# Altium footprint library FootPrintLib_8.PcbLib: 590 footprints (part 26 of 37)
Each footprint in its own frame and in the unit in brackets; x right, y up, seen from the top. Pads: shape width x height; smd on the part's side, far side on the other; paste and mask are expansions set on the pad; w line width, h text height; cw(c..) or ccw(c..) is an arc to the next point about the centre after c.
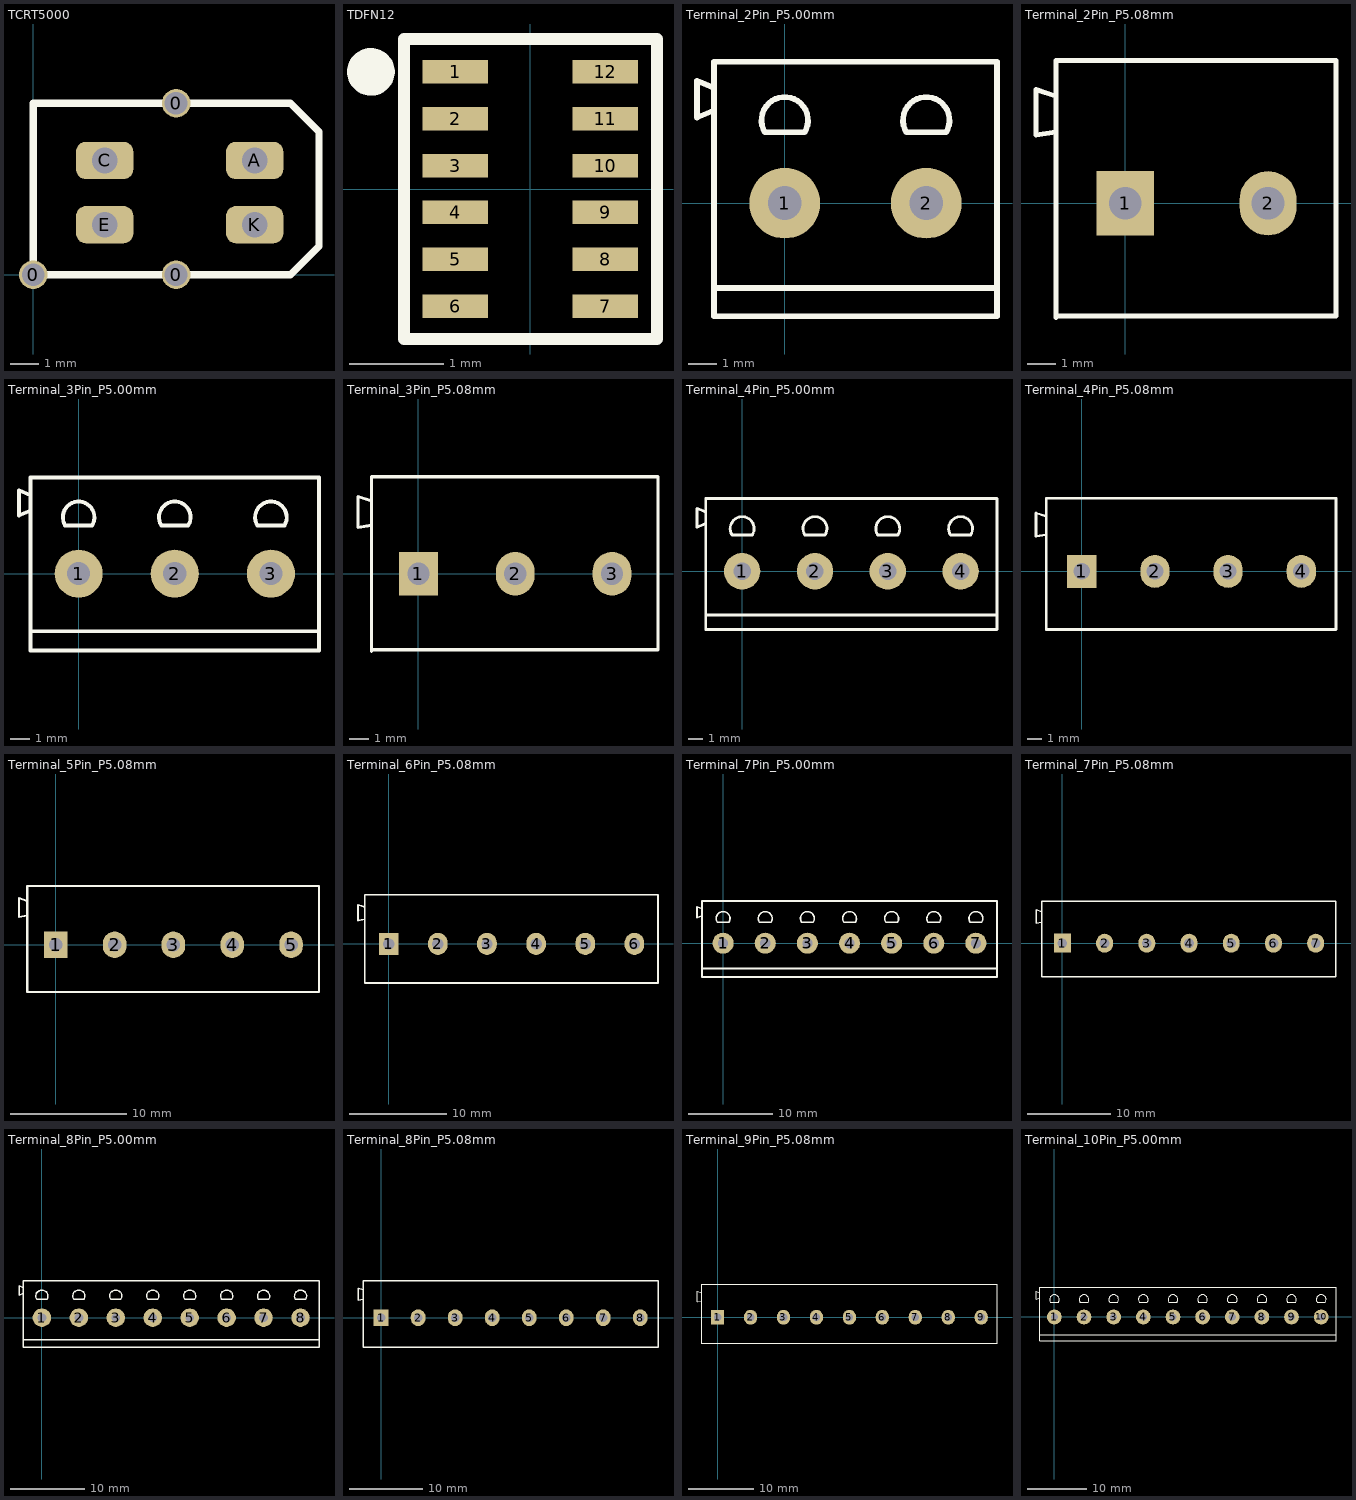
[diagram p25: the footprints below, top view; thin cyan lines are the x and y axes]

## TCRT5000 [mm] "IR Sensor 2LEDs"
pads (7):
  round 1 hole 0.8: 0(0,0) 0(5,0) 0(5,6)
  rrect50% 2x1.3 hole 0.9: A(7.75,4) C(2.5,4) E(2.5,1.75) K(7.75,1.75)
Top Overlay:
  lines w0.254: 0,0 0,6 9,6 10,5 10,1 9,0 0,0

## TDFN12 [mm] "TDFN12 (2x3mm)"
height 0.8
pads (12):
  rect 0.7x0.25 smd: 1(-0.8,1.25) 2(-0.8,0.75) 3(-0.8,0.25) 4(-0.8,-0.25) 5(-0.8,-0.75) 6(-0.8,-1.25) 7(0.8,-1.25) 8(0.8,-0.75) 9(0.8,-0.25) 10(0.8,0.25) 11(0.8,0.75) 12(0.8,1.25)
Top Overlay:
  circle w0.254: c-1.7,1.25 r0.127
  lines w0.127: -1.35,-1.6 -1.35,1.6 1.35,1.6 1.35,-1.6 -1.35,-1.6
3D body "User Library-DRV8836DSSR.step": height 0.8, standoff 0, extent -1.061,-1.55 1.059,1.55

## Terminal_2Pin_P5.00mm [mm] "Terminal Block; 2Pin; Pitch 5.00mm; Body 1000x900mm"
height 12.6
pads (2):
  round 2.5 hole 1.2: 1(0,0) 2(5,0)
Top Overlay:
  lines w0.2: -2.5,-3 7.5,-3 ; -2.5,3.275 -3.1,3.025 -3.1,4.325 -2.5,4.075 ; -2.5,-4 -2.5,5 7.5,5 7.5,-4 -2.5,-4 ; -0.7,2.5 cw(c0,2.929) 0.7,2.5 -0.7,2.5 ; 4.3,2.5 cw(c5,2.929) 5.7,2.5 4.3,2.5
3D body "terminal_blocks_a-tb500-ta02.stp": height 12.65, standoff -3.65, extent -3.1,-4 7.5,5

## Terminal_2Pin_P5.08mm [mil] "Terminal Block; 2 Pin; Pitch 5.08mm;"
pads (2):
  rect 80x90 hole 46: 1(-0.11,-0.35)
  oval 80x90 hole 46: 2(199.89,-0.35)
Top Overlay:
  lines w7: -97.11,99.65 -125.11,94.98 -125.11,158.98 -97.11,149.65 ; -97.11,-160.35 -97.11,-159.35 -97.11,-158.35 ; -97.11,-160.35 -97.11,-158.35 ; -97.11,-160.35 -97.11,199.65 294.89,199.65 294.89,-158.35 -97.11,-158.35
3D body "Socket Blue_2Pin.STEP": height 493, standoff -263.18, extent -127.56,-157.35 295.35,199.65

## Terminal_3Pin_P5.00mm [mm] "Terminal Block; 3Pin; Pitch 5.00mm; Body 1500x900mm"
height 12.6
pads (3):
  round 2.5 hole 1.2: 1(0,0) 2(5,0) 3(10,0)
Top Overlay:
  lines w0.2: -2.5,-3 12.5,-3 ; -2.5,3.275 -3.1,3.025 -3.1,4.325 -2.5,4.075 ; -2.5,-4 12.5,-4 12.5,5 -2.5,5 -2.5,-4 ; -0.7,2.5 cw(c0,2.929) 0.7,2.5 -0.7,2.5 ; 4.3,2.5 cw(c5,2.929) 5.7,2.5 4.3,2.5 ; 9.3,2.5 cw(c10,2.929) 10.7,2.5 9.3,2.5
3D body "terminal_blocks_a-tb500-ta03.stp": height 12.65, standoff -3.65, extent -3.1,-4 12.5,5

## Terminal_3Pin_P5.08mm [mil] "Terminal Block; 3 Pin; Pitch 5.08mm;"
pads (3):
  rect 80x90 hole 46: 1(0,0)
  oval 80x90 hole 46: 2(200,0) 3(400,0)
Top Overlay:
  lines w7: -97,100 -125,95.33 -125,159.33 -97,150 ; -97,-160 -97,-157.44 495.05,-157.44 495.05,200 -97,200 -97,-160
3D body "Socket Blue_3Pin.STEP": height 503, standoff -253.18, extent -127.87,-157.44 495.05,199.56

## Terminal_4Pin_P5.00mm [mm] "Terminal Block; 4Pin; Pitch 5.00mm; Body 2000x900mm"
height 12.6
pads (4):
  round 2.5 hole 1.2: 1(0,0) 2(5,0) 3(10,0) 4(15,0)
Top Overlay:
  lines w0.2: -2.5,-3 17.5,-3 ; -2.5,3.275 -3.1,3.025 -3.1,4.325 -2.5,4.075 ; -2.5,-4 -2.5,5 17.5,5 17.5,-4 -2.5,-4 ; -0.7,2.5 cw(c0,2.929) 0.7,2.5 -0.7,2.5 ; 4.3,2.5 cw(c5,2.929) 5.7,2.5 4.3,2.5 ; 9.3,2.5 cw(c10,2.929) 10.7,2.5 9.3,2.5 ; 14.3,2.5 cw(c15,2.929) 15.7,2.5 14.3,2.5
3D body "terminal_blocks_a-tb500-ta04.stp": height 12.65, standoff -3.65, extent -3.1,-4 17.5,5

## Terminal_4Pin_P5.08mm [mil] "Terminal Block; 4 Pin; Pitch 5.08mm;"
pads (4):
  rect 80x90 hole 46: 1(0.02,-0.14)
  oval 80x90 hole 46: 2(200.02,-0.14) 3(400.02,-0.14) 4(600.02,-0.14)
Top Overlay:
  lines w7: -96.98,99.86 -124.98,95.2 -124.98,159.2 -96.98,149.86 ; -96.98,-160.14 -96.98,199.86 694.93,199.86 694.93,-159.14 -96.98,-159.14 ; -96.98,-160.14 -96.98,-158.14 -96.98,-159.14 ; -96.98,-160.14 -96.98,-159.14
3D body "Socket Blue_4Pin.STEP": height 493, standoff -263.18, extent -127.98,-159.14 694.93,197.86

## Terminal_5Pin_P5.08mm [mil] "Terminal Block; 5Pin; Pitch 5.08mm;"
pads (5):
  rect 80x90 hole 46: 1(0,0)
  oval 80x90 hole 46: 2(200,0) 3(400,0) 4(600,0) 5(800,0)
Top Overlay:
  lines w7: -97,100 -125,95.33 -125,159.33 -97,150 ; -97,-160 895,-160 895,200 -97,200 -97,-160
3D body "Socket Blue_5Pin.STEP": height 493, standoff -263.18, extent -125,-158.5 897.91,198.5

## Terminal_6Pin_P5.08mm [mil] "Terminal Block; 6Pin; Pitch 5.08mm;"
pads (6):
  rect 80x90 hole 46: 1(0,0)
  oval 80x90 hole 46: 2(200,0) 3(400,0) 4(600,0) 5(800,0) 6(1000,0)
Top Overlay:
  lines w7: -97,-158 -97,-160 ; -97,100 -125,95.33 -125,159.33 -97,150 ; -97,-160 -97,-159 1096,-159 1096,200 -97,200 -97,-160
3D body "Socket Blue_6Pin.STEP": height 493, standoff -263.18, extent -126.91,-159 1096,198

## Terminal_7Pin_P5.00mm [mm] "Terminal Block; 7Pin; Pitch 5.00mm; Body 3500x900mm"
height 12.6
pads (7):
  round 2.5 hole 1.2: 1(0,0) 2(5,0) 3(10,0) 4(15,0) 5(20,0) 6(25,0) 7(30,0)
Top Overlay:
  lines w0.2: -2.5,-3 32.5,-3 ; -2.5,3.275 -3.1,3.025 -3.1,4.325 -2.5,4.075 ; -2.5,-4 32.5,-4 32.5,5 -2.5,5 -2.5,-4 ; -0.7,2.5 cw(c0,2.929) 0.7,2.5 -0.7,2.5 ; 4.3,2.5 cw(c5,2.929) 5.7,2.5 4.3,2.5 ; 9.3,2.5 cw(c10,2.929) 10.7,2.5 9.3,2.5 ; 14.3,2.5 cw(c15,2.929) 15.7,2.5 14.3,2.5 ; 19.3,2.5 cw(c20,2.929) 20.7,2.5 19.3,2.5 ; 24.3,2.5 cw(c25,2.929) 25.7,2.5 24.3,2.5 ; 29.3,2.5 cw(c30,2.929) 30.7,2.5 29.3,2.5
3D body "terminal_blocks_a-tb500-ta07.stp": height 12.65, standoff -3.65, extent -3.1,-4 32.5,5

## Terminal_7Pin_P5.08mm [mil] "Terminal Block; 7Pin; Pitch 5.08mm;"
pads (7):
  rect 80x90 hole 46: 1(0,0)
  oval 80x90 hole 46: 2(200,0) 3(400,0) 4(600,0) 5(800,0) 6(1000,0) 7(1200,0)
Top Overlay:
  lines w7: -97,-160 -97,200 1296.28,200 1296.28,-159.15 -97,-159.15 ; -97,100 -125,95.33 -125,159.33 -97,150
3D body "Socket Blue_7Pin.STEP": height 493, standoff -263.18, extent -126.64,-159.15 1296.28,197.85

## Terminal_8Pin_P5.00mm [mm] "Terminal Block; 8Pin; Pitch 5.00mm; Body 4000x900mm"
height 12.6
pads (8):
  round 2.5 hole 1.2: 1(0,0) 2(5,0) 3(10,0) 4(15,0) 5(20,0) 6(25,0) 7(30,0) 8(35,0)
Top Overlay:
  lines w0.2: -2.5,-3 37.5,-3 ; -2.5,3.275 -3.1,3.025 -3.1,4.325 -2.5,4.075 ; -2.5,-4 37.5,-4 37.5,5 -2.5,5 -2.5,-4 ; -0.7,2.5 cw(c0,2.929) 0.7,2.5 -0.7,2.5 ; 4.3,2.5 cw(c5,2.929) 5.7,2.5 4.3,2.5 ; 9.3,2.5 cw(c10,2.929) 10.7,2.5 9.3,2.5 ; 14.3,2.5 cw(c15,2.929) 15.7,2.5 14.3,2.5 ; 19.3,2.5 cw(c20,2.929) 20.7,2.5 19.3,2.5 ; 24.3,2.5 cw(c25,2.929) 25.7,2.5 24.3,2.5 ; 29.3,2.5 cw(c30,2.929) 30.7,2.5 29.3,2.5 ; 34.3,2.5 cw(c35,2.929) 35.7,2.5 34.3,2.5
3D body "terminal_blocks_a-tb500-ta08.stp": height 12.65, standoff -3.65, extent -3.1,-4 37.5,5

## Terminal_8Pin_P5.08mm [mil] "Terminal Block; 9Pin; Pitch 5.08mm;"
pads (8):
  rect 80x90 hole 46: 1(0,0)
  oval 80x90 hole 46: 2(200,0) 3(400,0) 4(600,0) 5(800,0) 6(1000,0) 7(1200,0) 8(1400,0)
Top Overlay:
  lines w7: -97,-159.5 1495.91,-159.5 1495.91,200 -97,200 -97,-160 -97,-158 ; -97,100 -125,95.33 -125,159.33 -97,150
3D body "Socket Blue_8Pin.STEP": height 493, standoff -263.18, extent -127,-159.5 1495.91,197.5

## Terminal_9Pin_P5.08mm [mil] "Terminal Block; 9Pin; Pitch 5.08mm;"
pads (9):
  rect 80x90 hole 46: 1(0,0)
  oval 80x90 hole 46: 2(200,0) 3(400,0) 4(600,0) 5(800,0) 6(1000,0) 7(1200,0) 8(1400,0) 9(1600,0)
Top Overlay:
  lines w7: -97,100 -125,95.33 -125,159.33 -97,150 ; -97,-160 -97,-158 1696,-158 1696,200 -97,200 -97,-160
3D body "Socket Blue_9Pin.STEP": height 493, standoff -263.18, extent -126.91,-158 1696,199

## Terminal_10Pin_P5.00mm [mm] "Terminal Block; 10Pin; Pitch 5.00mm; Body 5000x900mm"
height 12.6
pads (10):
  round 2.5 hole 1.2: 1(0,0) 2(5,0) 3(10,0) 4(15,0) 5(20,0) 6(25,0) 7(30,0) 8(35,0) 9(40,0) 10(45,0)
Top Overlay:
  lines w0.2: -2.5,-3 47.5,-3 ; -2.5,3.275 -3.1,3.025 -3.1,4.325 -2.5,4.075 ; -2.5,-4 -2.5,5 47.5,5 47.5,-4 -2.5,-4 ; -0.7,2.5 cw(c0,2.929) 0.7,2.5 -0.7,2.5 ; 4.3,2.5 cw(c5,2.929) 5.7,2.5 4.3,2.5 ; 9.3,2.5 cw(c10,2.929) 10.7,2.5 9.3,2.5 ; 14.3,2.5 cw(c15,2.929) 15.7,2.5 14.3,2.5 ; 19.3,2.5 cw(c20,2.929) 20.7,2.5 19.3,2.5 ; 24.3,2.5 cw(c25,2.929) 25.7,2.5 24.3,2.5 ; 29.3,2.5 cw(c30,2.929) 30.7,2.5 29.3,2.5 ; 34.3,2.5 cw(c35,2.929) 35.7,2.5 34.3,2.5 ; 39.3,2.5 cw(c40,2.929) 40.7,2.5 39.3,2.5 ; 44.3,2.5 cw(c45,2.929) 45.7,2.5 44.3,2.5
3D body "terminal_blocks_a-tb500-ta10.stp": height 12.65, standoff -3.65, extent -3.1,-4 47.5,5